# Altium footprint library Footprints.PcbLib: 320 footprints (part 19 of 20)
Each footprint in its own frame and in the unit in brackets; x right, y up, seen from the top. Pads: shape width x height; smd on the part's side, far side on the other; paste and mask are expansions set on the pad; w line width, h text height; cw(c..) or ccw(c..) is an arc to the next point about the centre after c.
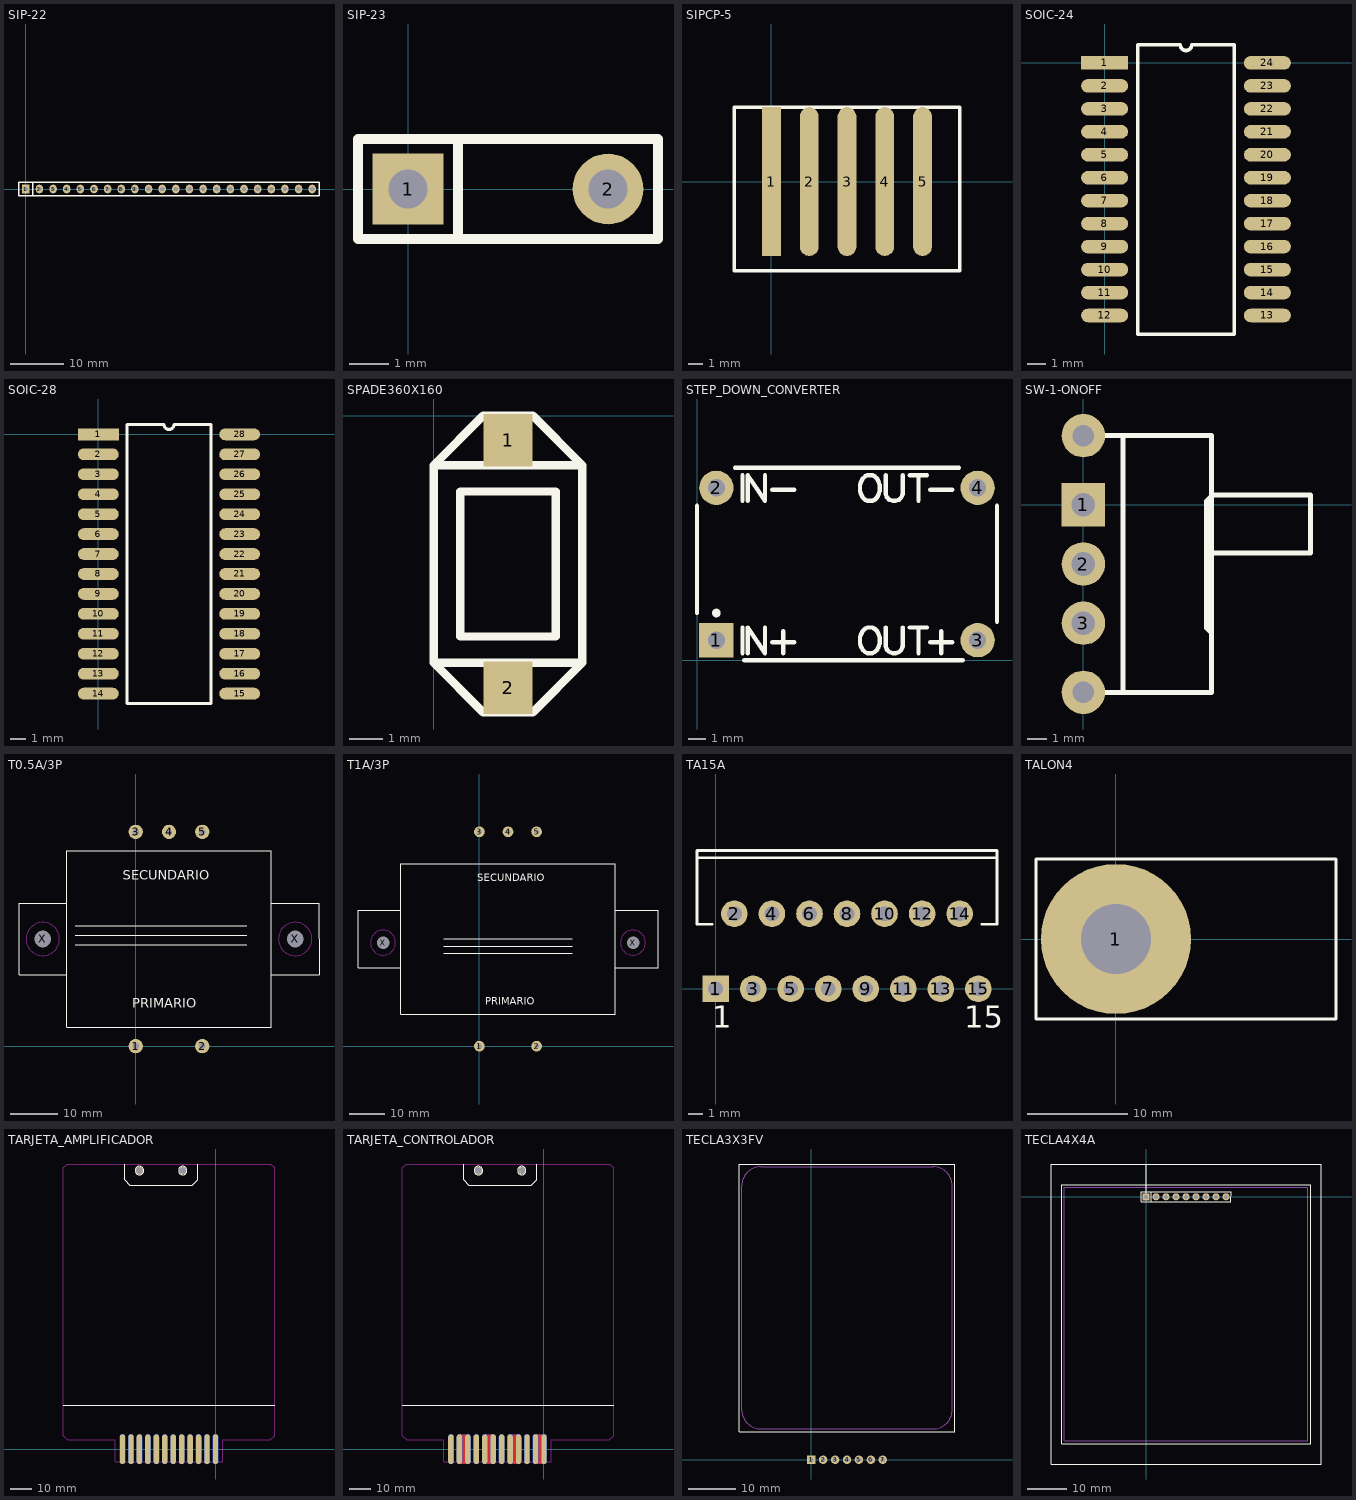
[diagram p18: the footprints below, top view; thin cyan lines are the x and y axes]

## SIP-22 [mm]
pads (22):
  rect 1.4x1.6 hole 0.8: 1(0,0)
  oval 1.4x1.6 hole 0.8: 2(2.54,0) 3(5.08,0) 4(7.62,0) 5(10.16,0) 6(12.7,0) 7(15.24,0) 8(17.78,0) 9(20.32,0) 10(22.86,0) 11(25.4,0) 12(27.94,0) 13(30.48,0) 14(33.02,0) 15(35.56,0) 16(38.1,0) 17(40.64,0) 18(43.18,0) 19(45.72,0) 20(48.26,0) 21(50.8,0) 22(53.34,0)
Top Overlay:
  lines w0.254: 1.27,-1.27 1.27,1.27 ; -1.27,-1.27 54.61,-1.27 54.61,1.27 -1.27,1.27 -1.27,-1.27

## SIP-23 [mm]
pads (2):
  rect 1.8x1.8 hole 1: 1(0,0)
  round 1.8 hole 1: 2(5.08,0)
Top Overlay:
  lines w0.254: 1.27,-1.27 1.27,1.27 ; -1.27,-1.27 -1.27,1.27 6.35,1.27 6.35,-1.27 -1.27,-1.27

## SIPCP-5 [mm]
pads (5):
  rect 1.27x10 smd: 1(0,0)
  oval 1.27x10 smd: 2(2.54,0) 3(5.08,0) 4(7.62,0) 5(10.16,0)
Top Overlay:
  lines w0.254: -2.5,-6 12.66,-6 12.66,5 -2.5,5 -2.5,-6

## SOIC-24 [mm]
pads (24):
  rect 2.6x0.75 smd: 1(0,0)
  oval 2.6x0.75 smd: 2(0,-1.27) 3(0,-2.54) 4(0,-3.81) 5(0,-5.08) 6(0,-6.35) 7(0,-7.62) 8(0,-8.89) 9(0,-10.16) 10(0,-11.43) 11(0,-12.7) 12(0,-13.97) 13(9,-13.97) 14(9,-12.7) 15(9,-11.43) 16(9,-10.16) 17(9,-8.89) 18(9,-7.62) 19(9,-6.35) 20(9,-5.08) 21(9,-3.81) 22(9,-2.54) 23(9,-1.27) 24(9,0)
Top Overlay:
  lines w0.2: 1.835,1 1.835,-15 7.165,-15 7.165,1 ; 1.835,1.005 4.182,1.005 ccw(c4.5,1.005) 4.817,1.005 7.165,1.005

## SOIC-28 [mm]
pads (28):
  rect 2.6x0.75 smd: 1(0,0)
  oval 2.6x0.75 smd: 2(0,-1.27) 3(0,-2.54) 4(0,-3.81) 5(0,-5.08) 6(0,-6.35) 7(0,-7.62) 8(0,-8.89) 9(0,-10.16) 10(0,-11.43) 11(0,-12.7) 12(0,-13.97) 13(0,-15.24) 14(0,-16.51) 15(9,-16.51) 16(9,-15.24) 17(9,-13.97) 18(9,-12.7) 19(9,-11.43) 20(9,-10.16) 21(9,-8.89) 22(9,-7.62) 23(9,-6.35) 24(9,-5.08) 25(9,-3.81) 26(9,-2.54) 27(9,-1.27) 28(9,0)
Top Overlay:
  lines w0.2: 1.835,-17.145 7.165,-17.145 7.165,0.635 4.817,0.635 cw(c4.5,0.635) 4.182,0.635 1.835,0.635 1.835,-17.145

## SPADE360X160 [mm]
pads (2):
  rect 1.5x1.6 smd: 1(2.25,-0.75) 2(2.25,-8.25)
Top Overlay:
  lines w0.254: 0,-7.5 0,-1.5 ; 0,-7.5 4.5,-7.5 ; 0,-7.5 1.5,-9 3,-9 4.5,-7.5 ; 0,-1.5 4.5,-1.5 ; 0,-1.5 1.5,0 3,0 4.5,-1.5 ; 4.5,-7.5 4.5,-1.5 ; 0.8,-6.7 3.7,-6.7 3.7,-2.3 0.8,-2.3 0.8,-6.7

## STEP_DOWN_CONVERTER [mm]
pads (4):
  rect 2x2 hole 1: 1(1.13,1.165)
  round 2 hole 1: 2(1.13,10.055) 3(16.37,1.165) 4(16.37,10.055)
Top Overlay:
  circle w0.254: c1.13,2.75 r0.125
  lines w0.254: 0,2.75 0,9 ; 2.22,11.22 15.28,11.22 ; 2.654,0.403 2.654,1.903 ; 2.654,9.293 2.654,10.793 ; 2.75,0 15.5,0 ; 2.968,0.403 2.968,1.903 3.968,0.403 3.968,1.903 ; 2.968,9.293 2.968,10.793 3.968,9.293 3.968,10.793 ; 4.382,1.046 5.668,1.046 ; 4.382,9.936 5.668,9.936 ; 5.025,0.403 5.025,1.688 ; 11.005,1.903 11.005,0.831 11.076,0.617 11.219,0.474 11.433,0.403 11.576,0.403 11.79,0.474 11.933,0.617 12.004,0.831 12.004,1.903 ; 11.005,10.793 11.005,9.721 11.076,9.507 11.219,9.364 11.433,9.293 11.576,9.293 11.79,9.364 11.933,9.507 12.004,9.721 12.004,10.793 ; 12.419,1.903 13.418,1.903 ; 12.419,10.793 13.418,10.793 ; 12.918,0.403 12.918,1.903 ; 12.918,9.293 12.918,10.793 ; 13.597,1.046 14.882,1.046 ; 13.597,9.936 14.882,9.936 ; 14.24,0.403 14.24,1.688 ; 17.5,2.25 17.5,9 ; 9.512,0.974 9.583,0.76 9.655,0.617 9.798,0.474 9.94,0.403 10.226,0.403 10.369,0.474 10.512,0.617 10.583,0.76 10.655,0.974 10.655,1.331 10.583,1.546 10.512,1.688 10.369,1.831 10.226,1.903 9.94,1.903 9.798,1.831 9.655,1.688 9.583,1.546 9.512,1.331 9.512,0.974 ; 9.512,9.864 9.583,9.65 9.655,9.507 9.798,9.364 9.94,9.293 10.226,9.293 10.369,9.364 10.512,9.507 10.583,9.65 10.655,9.864 10.655,10.221 10.583,10.436 10.512,10.578 10.369,10.721 10.226,10.793 9.94,10.793 9.798,10.721 9.655,10.578 9.583,10.436 9.512,10.221 9.512,9.864
3D body "Convertidor STEP DOWN.step": height 6.63, standoff -6.69, extent -0.14,-0.105 17.64,11.325

## SW-1-ONOFF [mm]
pads (5):
  rect 2.2x2.2 hole 1.2: 1(0,0)
  round 2.2 hole 1.2: 2(0,-3) 3(0,-6)
  round 2.2 hole 1.1: ""(0,-9.5) ""(0,3.5)
Top Overlay:
  lines w0.254: 0,-9.5 6.5,-9.5 6.5,3.5 0,3.5 ; 2,-9.5 2,3.5 ; 6.5,-6.5 6.25,-6.25 6.25,0.2 6.55,0.5 11.5,0.5 11.5,-2.45 6.5,-2.45

## T0.5A/3P [mm]
pads (7):
  round 3 hole 1.3: 1(0,0) 2(14,0) 3(0,45) 4(7,45) 5(14,45)
  round 3 hole 3.5: X(-19.5,22.5) X(33.5,22.5)
Top Overlay:
  lines w0.254: -14.5,15 -24.5,15 -24.5,30 -14.5,30 ; -12.71,21.33 23.29,21.33 ; -12.71,23.33 23.29,23.33 ; -12.71,25.33 23.29,25.33 ; 28.5,15 38.5,15 38.5,30 28.5,30 ; -14.5,4 28.5,4 28.5,41 -14.5,41 -14.5,4
  text "SECUNDARIO" at -2.73,34.91 h2
  text "PRIMARIO" at -0.68,8.03 h2
Keep-Out Layer:
  circle w0.254: c-19.5,22.5 r3.5
  circle w0.254: c33.49,22.5 r3.5

## T1A/3P [mm]
pads (7):
  round 3 hole 1.3: 1(0,0) 2(16,0) 3(0,60) 4(8,60) 5(16,60)
  round 3 hole 3.5: X(-27,29) X(43,29)
Top Overlay:
  lines w0.254: -22,22 -34,22 -34,38 -22,38 ; -10,26 26,26 ; -10,28 26,28 ; -10,30 26,30 ; 38,22 50,22 50,38 38,38 ; -22,9 -22,51 38,51 38,9 -22,9
  text "PRIMARIO" at 1.6,11.53 h2
  text "SECUNDARIO" at -0.6,46.14 h2
Keep-Out Layer:
  circle w0.254: c42.99,29 r3.5
  circle w0.254: c-27,29 r3.5

## TA15A [mm]
pads (15):
  rect 1.8x1.8 hole 1: 1(0,0)
  round 1.8 hole 1: 2(1.27,5.08) 3(2.54,0) 4(3.81,5.08) 5(5.08,0) 6(6.35,5.08) 7(7.62,0) 8(8.89,5.08) 9(10.16,0) 10(11.43,5.08) 11(12.7,0) 12(13.97,5.08) 13(15.24,0) 14(16.51,5.08) 15(17.78,0)
Top Overlay:
  lines w0.2: -1.26,8.87 18.94,8.87 ; -0.254,4.37 -1.26,4.37 -1.26,9.37 19.04,9.37 19.04,4.37 18.034,4.37
  text "1" at -0.23,-2.625 h1.5
  text "15" at 16.84,-2.625 h1.5

## TALON4 [mm]
pads (1):
  round 15 hole 7: 1(0,0)
Top Overlay:
  lines w0.254: -8,-8 -8,8 22,8 22,-8 -8,-8

## TARJETA_AMPLIFICADOR [mm]
pads (26):
  rrect100% 2.54x14 smd far side: 1(0,0) 2(-4,0) 3(-8,0) 4(-12,0) 5(-16,0) 6(-20,0) 7(-24,0) 8(-28,0) 9(-32,0) 10(-36,0) 11(-40,0) 12(-44,0)
  rrect100% 2.54x14 smd: A(0,0) B(-4,0) C(-8,0) D(-12,0) E(-16,0) F(-20,0) H(-24,0) J(-28,0) K(-32,0) L(-36,0) M(-40,0) N(-44,0)
  round 3.5 hole 3: TORNILLO1(-36,131.8) TORNILLO2(-15.5,131.8)
Top Layer:
  text "N" at -50.14,6.17 h1.52
  text "A" at 4.93,6.17 h1.52
Bottom Layer:
  text "1" at 6.2,6.17 h1.52
  text "12" at -48.87,6.17 h1.52
Top Overlay:
  circle w0.254: c-36,131.8 r2
  circle w0.254: c-15.5,131.8 r2
  lines w0.254: -72,20.9 28,20.9 ; -43,134.9 -43,127.4 -40.5,124.9 -11,124.9 -8.5,127.4 -8.5,134.9
Top Paste:
  rectangle: -48,-6.6 4,7.4
Bottom Paste:
  rectangle: -48,-6.6 4,7.4
Top Solder:
  rectangle: -48,-6.6 4,7.4
Bottom Solder:
  rectangle: -48,-6.6 4,7.4
Keep-Out Layer:
  lines w0.254: -70.168,134.865 -72,133.032 -72,6.4 -70,4.4 -47.5,4.4 -47.5,-5.85 3.5,-5.85 3.5,4.4 26,4.4 28,6.4 28,133.032 26.132,134.9 -70.168,134.9
3D body: height 0, standoff 0, extent -72.127,-5.977 28.127,135.027

## TARJETA_CONTROLADOR [mm]
pads (26):
  rrect100% 2.54x14 smd far side: 1(0,0) 2(-4,0) 3(-8,0) 4(-12,0) 5(-16,0) 6(-20,0) 7(-24,0) 8(-28,0) 9(-32,0) 10(-36,0) 11(-40,0) 12(-44,0)
  rrect100% 2.54x14 smd: A(0,0) B(-4,0) C(-8,0) D(-12,0) E(-16,0) F(-20,0) H(-24,0) J(-28,0) K(-32,0) L(-36,0) M(-40,0) N(-44,0)
  round 3.5 hole 3: TORNILLO1(-31,131.8) TORNILLO2(-10.5,131.8)
Top Layer:
  rectangle: -4,-7 0.1,7
  rectangle: -16,-7 -12,7
  rectangle: -28,-7 -24,7
  rectangle: -40,-7 -36,7
  text "N" at -50.14,6.17 h1.52
  text "A" at 4.93,6.17 h1.52
Bottom Layer:
  rectangle: -4,-7 0,7
  rectangle: -16,-7 -12,7
  rectangle: -28,-7 -24,7
  rectangle: -40,-7 -36,7
  text "1" at 6.2,6.17 h1.52
  text "12" at -48.87,6.17 h1.52
Top Overlay:
  circle w0.254: c-10.5,131.8 r2
  circle w0.254: c-31,131.8 r2
  lines w0.254: -67,20.9 33,20.9 ; -38,134.9 -38,127.4 -35.5,124.9 -6,124.9 -3.5,127.4 -3.5,134.9
Top Paste:
  rectangle: -48,-6.6 4,7.4
Bottom Paste:
  rectangle: -48,-6.6 4,7.4
Top Solder:
  rectangle: -48,-6.6 4,7.4
Bottom Solder:
  rectangle: -48,-6.6 4,7.4
Keep-Out Layer:
  lines w0.254: -67,6.4 -67,133.032 -65.132,134.9 31.152,134.9 33,133.052 33,6.4 31,4.4 3.5,4.4 3.5,-5.85 -47.5,-5.85 -47.5,4.4 -65,4.4 -67,6.4
3D body: height 0, standoff 0, extent -67.127,-5.977 33.127,135.027

## TECLA3X3FV [mm]
pads (7):
  rect 1.8x1.8 hole 1: 1(0,0)
  round 1.8 hole 1: 2(2.54,0) 3(5.08,0) 4(7.62,0) 5(10.16,0) 6(12.7,0) 7(15.24,0)
Top Overlay:
  lines w0.25: -15.38,6 30.62,6 30.62,63 -15.38,63 -15.38,6
Mechanical 1:
  lines w0.25: -14.78,10.6 ccw(c-10.78,10.6) -10.78,6.6 26.02,6.6 ccw(c26.02,10.6) 30.02,10.6 30.02,58.4 ccw(c26.02,58.4) 26.02,62.4 -10.78,62.4 ccw(c-10.78,58.4) -14.78,58.4 -14.78,10.6

## TECLA4X4A [mm]
pads (9):
  rect 1.8x1.8 hole 1: 1(0,0)
  round 1.8 hole 1: 2(2.54,0) 3(5.08,0) 4(7.62,0) 5(10.16,0) 6(12.7,0) 7(15.24,0) 8(17.78,0) 9(20.32,0)
Top Overlay:
  lines w0.254: 0,0 0,8.331 ; 1.27,-1.27 1.27,1.27 ; -24.13,-67.869 44.45,-67.869 44.45,8.331 -24.13,8.331 -24.13,-67.869 ; -21.463,-62.662 41.783,-62.662 41.783,3.124 -21.463,3.124 -21.463,-62.662 ; -1.27,-1.27 -1.27,1.27 21.59,1.27 21.59,-1.27 -1.27,-1.27
Mechanical 1:
  lines w0.254: -20.713,-61.912 41.037,-61.912 41.037,2.368 -20.713,2.368 -20.713,-61.912